# Altium schematic symbol library RC-Car_Components.SchLib: 2 symbols
Pins are listed as number, name and electrical type; pins without a type are passive.

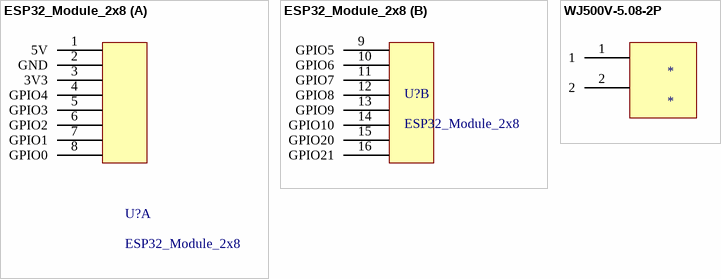
[diagram p0: symbols ESP32_Module_2x8 to WJ500V-5.08-2P]

## ESP32_Module_2x8
designator U?
part A pins: 1 5V, 2 GND, 3 3V3, 4 GPIO4, 5 GPIO3, 6 GPIO2, 7 GPIO1, 8 GPIO0
part B pins: 9 GPIO5, 10 GPIO6, 11 GPIO7, 12 GPIO8, 13 GPIO9, 14 GPIO10, 15 GPIO20, 16 GPIO21

## WJ500V-5.08-2P
designator *
pins: 1, 2